# Altium footprint library LimeMicroAltiumLib.PcbLib: 876 footprints (part 42 of 57)
Each footprint in its own frame and in the unit in brackets; x right, y up, seen from the top. Pads: shape width x height; smd on the part's side, far side on the other; paste and mask are expansions set on the pad; w line width, h text height; cw(c..) or ccw(c..) is an arc to the next point about the centre after c.
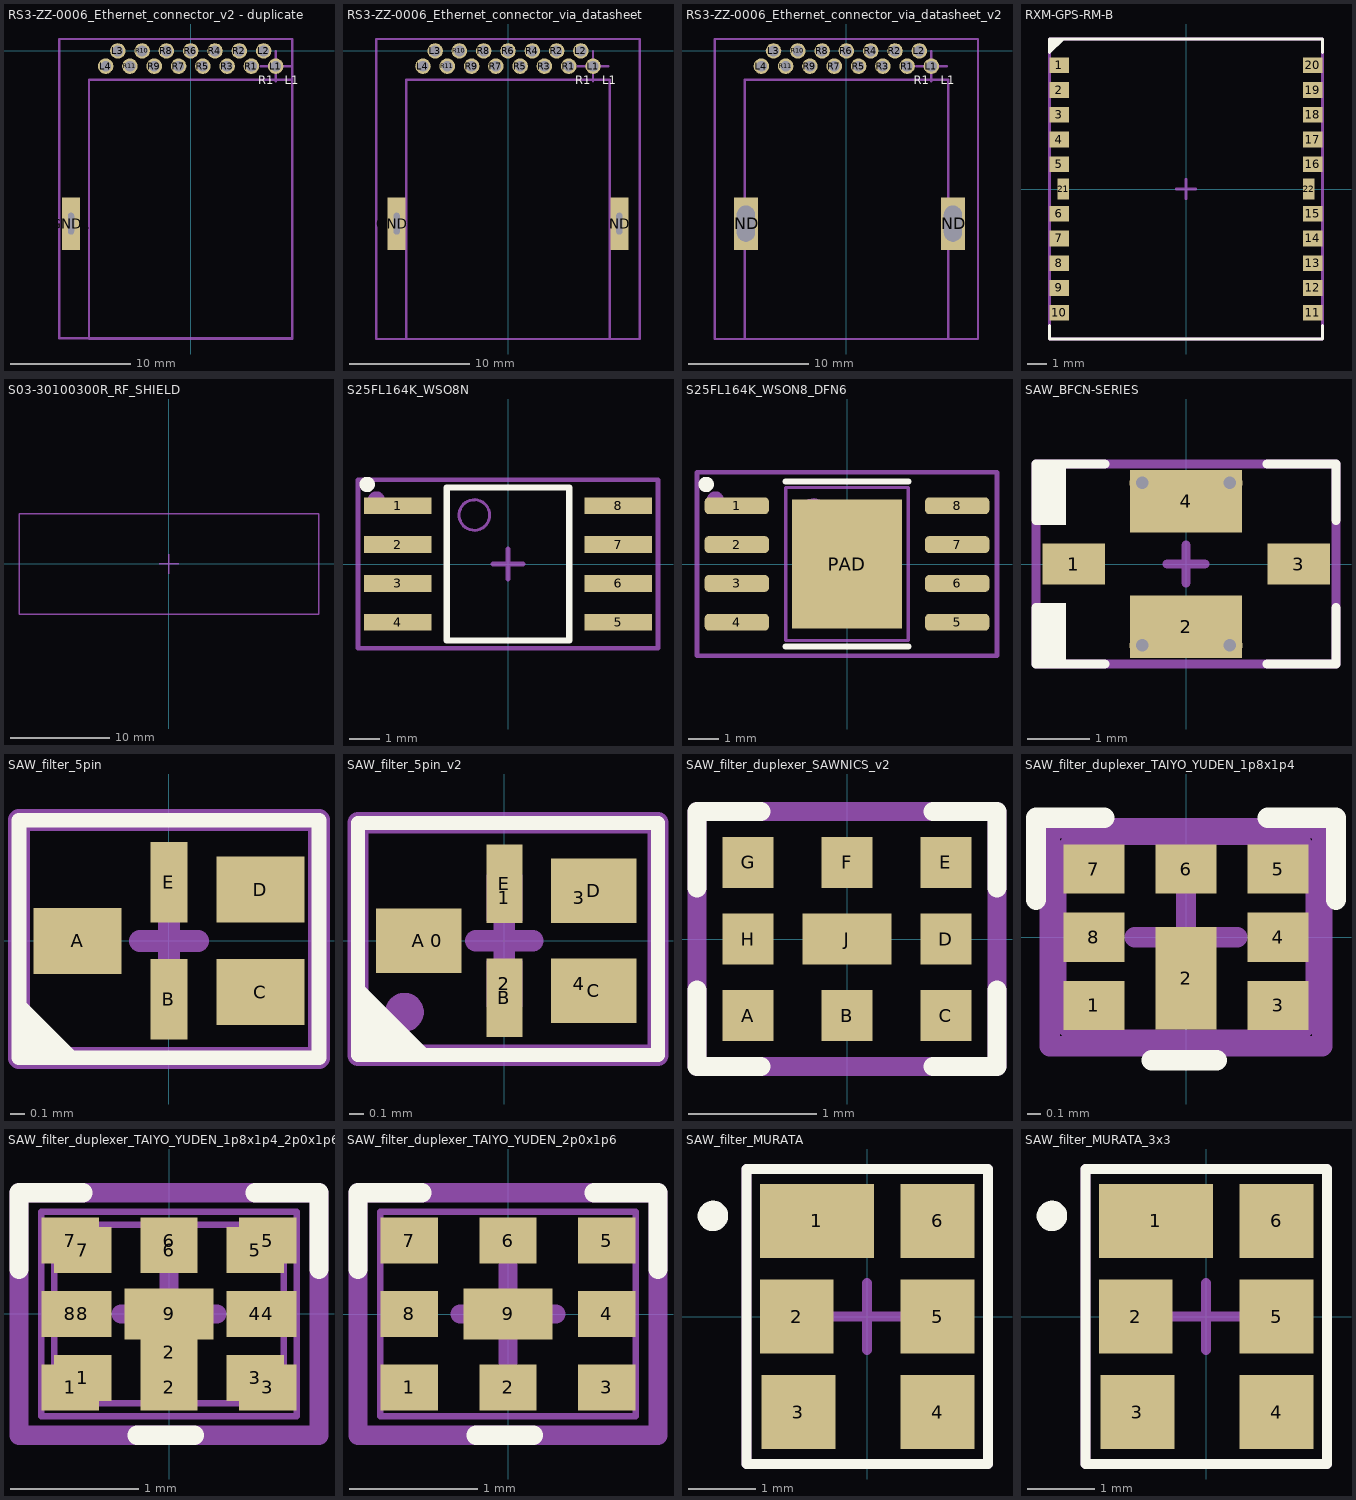
[diagram p41: the footprints below, top view; thin cyan lines are the x and y axes]

## RS3-ZZ-0006_Ethernet_connector_v2 - duplicate [mm] "Footprint created via PCB measurement and approximation"
pads (16):
  rect 1.5x4.4 hole 0.5 slot 1.8 at 90 deg mask+0.05: GND1(-10,-14.43)
  round 1.3 hole 0.9 mask+0.05: L1(7.105,-1.27) L2(6.09,0) L3(-6.09,0) L4(-7.105,-1.27) R1(5.075,-1.27) R2(4.06,0) R3(3.045,-1.27) R4(2.03,0) R5(1.015,-1.27) R6(0,0) R7(-1.015,-1.27) R8(-2.03,0) R9(-3.045,-1.27) R10(-4.06,0) R11(-5.075,-1.27)
Top Overlay:
  text "R1" at 5.625,-2.775 h0.7
  text "L1" at 7.875,-2.775 h0.7
Mechanical 13:
  lines w0.2: -8.5,-24.07 -8.5,-2.4 8.5,-2.4 8.5,-24.07 -8.5,-24.07
Mechanical 15:
  lines w0.2: 5.835,-1.27 7.105,-1.27 ; 7.105,-2.54 7.105,-1.27 ; 7.105,0 7.105,-1.27 ; 8.375,-1.27 7.105,-1.27 ; -11,-24 8.5,-24 8.5,1 -11,1 -11,-24
  text "L1" at 7.875,-2.775 h0.7
  text "R1" at 4.5,-3 h0.7
  text "L4" at -9.5,-2.5 h0.7
  text "L3" at -8.5,0 h0.7
  text "L2" at 7.5,0 h0.7
  text ".Designator" at 0,-12.5 h0.7

## RS3-ZZ-0006_Ethernet_connector_via_datasheet [mm] "Footprint created according to the datasheet"
pads (17):
  rect 1.5x4.4 hole 0.5 slot 1.8 at 90 deg mask+0.05: GND1(-9.3,-14.43) GND2(9.3,-14.43)
  round 1.3 hole 0.9 mask+0.05: L1(7.105,-1.27) L2(6.09,0) L3(-6.09,0) L4(-7.105,-1.27) R1(5.075,-1.27) R2(4.06,0) R3(3.045,-1.27) R4(2.03,0) R5(1.015,-1.27) R6(0,0) R7(-1.015,-1.27) R8(-2.03,0) R9(-3.045,-1.27) R10(-4.06,0) R11(-5.075,-1.27)
Top Overlay:
  text "R1" at 5.625,-2.775 h0.7
  text "L1" at 7.875,-2.775 h0.7
Mechanical 13:
  lines w0.2: -8.5,-24.07 -8.5,-2.4 8.5,-2.4 8.5,-24.07 -8.5,-24.07
Mechanical 15:
  lines w0.2: 5.835,-1.27 7.105,-1.27 ; 7.105,-2.54 7.105,-1.27 ; 7.105,0 7.105,-1.27 ; 8.375,-1.27 7.105,-1.27 ; -11,-24.07 11,-24.07 11,1 -11,1 -11,-24.07
  text "L1" at 7.875,-2.775 h0.7
  text "R1" at 4.5,-3 h0.7
  text "L4" at -9.5,-2.5 h0.7
  text "L3" at -8.5,0 h0.7
  text "L2" at 7.5,0 h0.7
  text ".Designator" at 0,-12.5 h0.7

## RS3-ZZ-0006_Ethernet_connector_via_datasheet_v2 [mm] "Footprint created according to the datasheet"
pads (17):
  rect 2x4.4 hole 1.5 slot 3 at 90 deg mask+0.05: GND2(-8.4,-14.43) GND2(8.9,-14.43)
  round 1.3 hole 0.9 mask+0.05: L1(7.105,-1.27) L2(6.09,0) L3(-6.09,0) L4(-7.105,-1.27) R1(5.075,-1.27) R2(4.06,0) R3(3.045,-1.27) R4(2.03,0) R5(1.015,-1.27) R6(0,0) R7(-1.015,-1.27) R8(-2.03,0) R9(-3.045,-1.27) R10(-4.06,0) R11(-5.075,-1.27)
Top Overlay:
  text "L1" at 7.875,-2.775 h0.7
  text "R1" at 5.625,-2.775 h0.7
Mechanical 13:
  lines w0.2: -8.5,-24.07 8.5,-24.07 8.5,-2.4 -8.5,-2.4 -8.5,-24.07
Mechanical 15:
  lines w0.2: 5.835,-1.27 7.105,-1.27 ; 7.105,-2.54 7.105,-1.27 ; 7.105,0 7.105,-1.27 ; 8.375,-1.27 7.105,-1.27 ; -11,-24.07 -11,1 11,1 11,-24.07 -11,-24.07
  text ".Designator" at 0,-12.5 h0.7
  text "L2" at 7.5,0 h0.7
  text "L3" at -8.5,0 h0.7
  text "L4" at -9.5,-2.5 h0.7
  text "R1" at 4.5,-3 h0.7
  text "L1" at 7.875,-2.775 h0.7

## RXM-GPS-RM-B [mm] "Linx GPS/GNSS receiver RM series"
pads (22):
  rect 1x0.8 smd mask+0.1: 1(-6.5,6.35) 2(-6.5,5.08) 3(-6.5,3.81) 4(-6.5,2.54) 5(-6.5,1.27) 6(-6.5,-1.27) 7(-6.5,-2.54) 8(-6.5,-3.81) 9(-6.5,-5.08) 10(-6.5,-6.35) 11(6.5,-6.35) 12(6.5,-5.08) 13(6.5,-3.81) 14(6.5,-2.54) 15(6.5,-1.27) 16(6.5,1.27) 17(6.5,2.54) 18(6.5,3.81) 19(6.5,5.08) 20(6.5,6.35)
  rect 0.6x1.1 smd mask+0.1: 21(-6.3,0) 22(6.3,0)
Top Overlay:
  region: -7,7 -7,7.7 -6.3,7.7
  lines w0.15: -7,-7 -7,-7.7 7,-7.7 7,-7 ; -6.3,7.7 -7,7 -7,7.7 7,7.7 7,7
Mechanical 15:
  lines w0.15: -0.5,0 0.5,0 ; 0,-0.5 0,0.5 ; -7,-7.7 -7,7.7 7,7.7 7,-7.7 -7,-7.7
  text "1" at -6.4,5.9 h0.55
  text "21" at -6.7,-0.4 h0.55
  text "22" at 5.6,-0.4 h0.55
  text "20" at 5.6,5.9 h0.55
  text "11" at 5.6,-6.75 h0.55
  text "10" at -6.7,-6.8 h0.55
  text ".Designator" at 0,0 h0.55
3D body "User Library-GPS Linx.step": height 2.2, standoff -0.01, extent -6.505,-7.475 6.505,7.525

## S03-30100300R_RF_SHIELD [mm]
Mechanical 15:
  lines w0.15: -1,0 0,0 ; 0,-1 0,0 ; 0,1 0,0 ; 1,0 0,0 ; -15.075,-5.075 15.075,-5.075 15.075,5.075 -15.075,5.075 -15.075,-5.075
  text ".Designator" at 0,0 h0.55
3D body "S03-30100300.stp": height 3.3, standoff 0.15, extent -15.075,-5.075 15.075,5.075

## S25FL164K_WSO8N [mm]
height 1.7
pads (8):
  rect 2.2x0.55 smd: 1(-3.6,1.905) 2(-3.6,0.635) 3(-3.6,-0.635) 4(-3.6,-1.905) 5(3.6,-1.905) 6(3.6,-0.635) 7(3.6,0.635) 8(3.6,1.905)
Top Overlay:
  circle w0.25: c-4.6,2.6 r0.125
  lines w0.2: -2,-2.5 2,-2.5 2,2.5 -2,2.5 -2,-2.5
Mechanical 13:
  circle w0.1: c-1.1,1.6 r0.5
  lines w0.1: -2,-2.5 2,-2.5 2,2.5 -2,2.5 -2,-2.5
Mechanical 15:
  circle w0.35: c-4.3,2.1 r0.1
  lines w0.15: -0.5,0 0.5,0 ; 0,-0.5 0,0.5 ; -4.9,-2.75 4.9,-2.75 4.9,2.75 -4.9,2.75 -4.9,-2.75
  text ".Designator" at 0,0 h0.55
3D body "User Library-SOIC8_Wide_5mmx5mm.step": height 1.75, standoff -0.01, extent -4.151,-2.73 3.95,2.73

## S25FL164K_WSON8_DFN6 [mm] "WSON8 and DFN8 6x5mm compatible footprint"
height 1.7
pads (9):
  rrect50% 2.1x0.55 smd mask+0.05: 1(-3.6,1.905) 2(-3.6,0.635) 3(-3.6,-0.635) 4(-3.6,-1.905) 5(3.6,-1.905) 6(3.6,-0.635) 7(3.6,0.635) 8(3.6,1.905)
  rect 3.6x4.2 smd mask+0.05: PAD(0,0)
Top Overlay:
  circle w0.25: c-4.6,2.6 r0.125
  lines w0.2: -2,-2.7 2,-2.7 ; -2,2.7 2,2.7
Mechanical 13:
  circle w0.1: c-1.1,1.6 r0.5
  lines w0.1: -2,-2.5 2,-2.5 2,2.5 -2,2.5 -2,-2.5
Mechanical 15:
  circle w0.35: c-4.3,2.1 r0.1
  lines w0.15: -0.5,0 0.5,0 ; 0,-0.5 0,0.5 ; -4.9,-3 4.9,-3 4.9,3 -4.9,3 -4.9,-3
  text ".Designator" at 0,0 h0.55
3D body "User Library-DFN8-5X6.STEP": height 0.95, standoff 0, extent -3.05,-2.5 3.05,2.5
3D body "User Library-SOIC8_Wide_5mmx5mm.step": height 1.75, standoff -0.01, extent -4.151,-2.73 3.95,2.73
3D body "User Library-WSON-8_6x8mm.STEP": height 0.81, standoff -0.07, extent -4.1,-3 3.9,3

## SAW_BFCN-SERIES [mm] "BFCN-1860+, 2435+, 2700+, 2850+, 4085+"
pads (4):
  rect 1x0.65 smd mask+0.05: 1(-1.8,0) 3(1.8,0)
  rect 1.8x1 smd mask+0.05: 2(0,-1) 4(0,1)
via -0.7,1.3 diameter 0.4 hole 0.2
via 0.7,1.3 diameter 0.4 hole 0.2
via 0.7,-1.3 diameter 0.4 hole 0.2
via -0.7,-1.3 diameter 0.4 hole 0.2
Top Overlay:
  region: -2.4,0.625 -1.925,0.625 -1.925,1.6 -2.4,1.6
  region: -2.4,-0.625 -1.925,-0.625 -1.925,-1.6 -2.4,-1.6
  lines w0.15: -2.4,-0.7 -2.4,-1.6 -1.3,-1.6 ; -2.4,0.7 -2.4,1.6 -1.3,1.6 ; 1.3,-1.6 2.4,-1.6 2.4,-0.7 ; 1.3,1.6 2.4,1.6 2.4,0.7
Mechanical 15:
  circle w0.25: c-1.8,0 r0.1
  lines w0.15: -0.3,0 0.3,0 ; 0,-0.3 0,0.3 ; -2.4,-1.6 -2.4,1.6 2.4,1.6 2.4,-1.6 -2.4,-1.6
  text ".Designator" at 0,0 h0.55
3D body: height 1, standoff 0, extent -1.6,-0.8 1.6,0.8

## SAW_filter_5pin [mm]
pads (5):
  rect 0.6x0.45 smd mask+0.05: A(-0.625,0) C(0.625,-0.35) D(0.625,0.35)
  rect 0.25x0.55 smd mask+0.05: B(0,-0.4) E(0,0.4)
Top Overlay:
  region: -1.025,-0.375 -0.6,-0.8 -1.025,-0.8
  lines w0.1: -1.025,-0.8 1.025,-0.8 1.025,0.825 -1.025,0.825 -1.025,-0.8
Mechanical 15:
  lines w0.15: -0.2,0 0.2,0 ; 0,-0.2 0,0.2 ; -1.025,-0.8 -1.025,0.825 1.025,0.825 1.025,-0.8 -1.025,-0.8
  text ".Designator" at 0.075,0 h0.55
3D body: height 0.4, standoff 0, extent -0.7,-0.55 0.7,0.55

## SAW_filter_5pin_v2 [mm]
pads (10):
  rect 0.25x0.325 on Mech13 mask+0.05: 0(-0.475,0) 1(0,0.3) 2(0,-0.3) 3(0.525,0.3) 4(0.525,-0.3)
  rect 0.6x0.45 smd mask+0.05: A(-0.6,0) C(0.625,-0.35) D(0.625,0.35)
  rect 0.25x0.55 smd mask+0.05: B(0,-0.4) E(0,0.4)
Top Overlay:
  region: -1.025,-0.275 -0.5,-0.8 -1.025,-0.8
  lines w0.1: -1.025,-0.8 1.075,-0.8 1.075,0.825 -1.025,0.825 -1.025,-0.8
Mechanical 15:
  circle w0.2: c-0.7,-0.5 r0.035
  lines w0.15: -0.2,0 0.2,0 ; 0,-0.2 0,0.2 ; -1.025,-0.8 -1.025,0.825 1.075,0.825 1.075,-0.8 -1.025,-0.8
  text ".Designator" at 0.075,0 h0.55
3D body: height 0.4, standoff 0, extent -0.7,-0.55 0.7,0.55

## SAW_filter_duplexer_SAWNICS_v2 [mm]
pads (9):
  rect 0.4x0.4 smd mask+0.05: A(-0.775,-0.6) B(0,-0.6) C(0.775,-0.6) D(0.775,0) E(0.775,0.6) F(0,0.6) G(-0.775,0.6) H(-0.775,0)
  rect 0.7x0.4 smd mask+0.05: J(0,0)
Top Overlay:
  lines w0.15: -1.175,-0.4 -1.175,-1 -0.675,-1 ; -1.175,0.4 -1.175,1 -0.675,1 ; 0.675,-1 1.175,-1 1.175,-0.4 ; 0.675,1 1.175,1 1.175,0.4
Mechanical 15:
  circle w0.2: c-0.75,-0.575 r0.035
  lines w0.15: -1.175,-1 1.175,-1 1.175,1 -1.175,1 -1.175,-1
  text ".Designator" at -0.025,0 h0.55
3D body: height 0.5, standoff 0, extent -1.025,-0.8 0.975,0.8

## SAW_filter_duplexer_TAIYO_YUDEN_1p8x1p4 [mm] "Duplexer Taiyo Yuden 1.8 mm x 1.4 mm size (ex. band 3 D6DA1G842K2C4)"
pads (8):
  rect 0.45x0.36 smd mask+0.05: 1(-0.675,-0.5) 3(0.675,-0.5) 4(0.675,0) 5(0.675,0.5) 6(0,0.5) 7(-0.675,0.5) 8(-0.675,0)
  rect 0.45x0.75 smd mask+0.05: 2(0,-0.3)
Top Overlay:
  lines w0.15: -1.1,0.275 -1.1,0.875 -0.6,0.875 ; -0.25,-0.9 0.225,-0.9 ; 0.6,0.875 1.1,0.875 1.1,0.275
Top Solder:
  region: -0.95,-0.725 -0.95,0.725 -0.4,0.725 -0.4,-0.725
  region: 0.95,-0.725 0.95,0.725 0.4,0.725 0.4,-0.725
Mechanical 13:
  region: -0.15,-0.575 -0.15,-0.005 0.15,-0.005 0.15,-0.575
  region: 0.775,-0.575 0.775,-0.345 0.475,-0.345 0.475,-0.575
  region: 0.775,0.345 0.775,0.575 0.475,0.575 0.475,0.345
  region: 0.775,-0.115 0.775,0.115 0.475,0.115 0.475,-0.115
  region: -0.15,0.345 -0.15,0.575 0.15,0.575 0.15,0.345
  region: -0.775,-0.115 -0.775,0.115 -0.475,0.115 -0.475,-0.115
  region: -0.775,0.345 -0.775,0.575 -0.475,0.575 -0.475,0.345
  region: -0.775,-0.575 -0.775,-0.345 -0.475,-0.345 -0.475,-0.575
  lines w0.05: -0.9,-0.7 0.9,-0.7 0.9,0.7 -0.9,0.7 -0.9,-0.7
  text "7" at -0.425,0.37 h0.2
  text "5" at 0.3,0.375 h0.2
  text "3" at 0.3,-0.55 h0.2
  text "1" at -0.425,-0.55 h0.2
Mechanical 15:
  circle w0.2: c-0.65,-0.5 r0.035
  lines w0.15: -0.375,0 0,0 ; 0,-0.375 0,0 ; 0,0.375 0,0 ; 0.375,0 0,0 ; -1,-0.8 -1,0.8 1,0.8 1,-0.8 -1,-0.8
  text ".Designator" at 0.075,0.075 h0.55
3D body: height 0.5, standoff 0, extent -0.9,-0.7 0.9,0.7

## SAW_filter_duplexer_TAIYO_YUDEN_1p8x1p4_2p0x1p6 [mm] "Duplexer Taiyo Yuden unified 1.8 mm x 1.4 mm size and 2 mm x 1.6 mm packages"
pads (17):
  rect 0.45x0.36 smd mask+0.05: 1(-0.775,-0.575) 1(-0.675,-0.5) 2(0,-0.575) 3(0.675,-0.5) 3(0.775,-0.575) 4(0.675,0) 4(0.775,0) 5(0.675,0.5) 5(0.775,0.575) 6(0,0.5) 6(0,0.575) 7(-0.775,0.575) 7(-0.675,0.5) 8(-0.775,0) 8(-0.675,0)
  rect 0.45x0.75 smd mask+0.05: 2(0,-0.3)
  rect 0.7x0.4 smd mask+0.05: 9(0,0)
Top Overlay:
  lines w0.15: -1.175,0.35 -1.175,0.95 -0.675,0.95 ; -0.25,-0.95 0.2,-0.95 ; 0.675,0.95 1.175,0.95 1.175,0.35
Top Solder:
  region: -1.05,-0.825 -1.05,0.825 1.05,0.825 1.05,-0.825
Mechanical 13:
  region: -0.15,-0.575 -0.15,-0.005 0.15,-0.005 0.15,-0.575
  region: 0.775,-0.575 0.775,-0.345 0.475,-0.345 0.475,-0.575
  region: 0.775,0.345 0.775,0.575 0.475,0.575 0.475,0.345
  region: 0.775,-0.115 0.775,0.115 0.475,0.115 0.475,-0.115
  region: -0.15,0.345 -0.15,0.575 0.15,0.575 0.15,0.345
  region: -0.775,-0.115 -0.775,0.115 -0.475,0.115 -0.475,-0.115
  region: -0.775,0.345 -0.775,0.575 -0.475,0.575 -0.475,0.345
  region: -0.775,-0.575 -0.775,-0.345 -0.475,-0.345 -0.475,-0.575
  region: 0.625,-0.15 0.625,0.15 0.925,0.15 0.925,-0.15
  region: -0.3,-0.15 -0.3,0.15 0.3,0.15 0.3,-0.15
  region: -0.925,0.725 -0.925,0.425 -0.625,0.425 -0.625,0.725
  region: -0.15,0.725 -0.15,0.425 0.15,0.425 0.15,0.725
  region: 0.625,0.725 0.625,0.425 0.925,0.425 0.925,0.725
  region: 0.625,-0.725 0.625,-0.425 0.925,-0.425 0.925,-0.725
  region: -0.925,-0.15 -0.925,0.15 -0.625,0.15 -0.625,-0.15
  region: -0.15,-0.725 -0.15,-0.425 0.15,-0.425 0.15,-0.725
  region: -0.925,-0.725 -0.925,-0.425 -0.625,-0.425 -0.625,-0.725
  lines w0.05: -1,-0.8 -1,0.8 1,0.8 1,-0.8 -1,-0.8 ; -0.9,-0.7 0.9,-0.7 0.9,0.7 -0.9,0.7 -0.9,-0.7
  text "7" at -0.425,0.37 h0.2
  text "5" at 0.3,0.375 h0.2
  text "3" at 0.3,-0.55 h0.2
  text "1" at -0.425,-0.55 h0.2
  text "1" at -0.55,-0.675 h0.2
  text "3" at 0.4,-0.675 h0.2
  text "5" at 0.4,0.475 h0.2
  text "7" at -0.55,0.475 h0.2
Mechanical 15:
  circle w0.2: c-0.8,-0.575 r0.035
  lines w0.15: -0.375,0 0,0 ; 0,-0.375 0,0 ; 0,0.375 0,0 ; 0.375,0 0,0 ; -1.175,-0.95 -1.175,0.95 1.175,0.95 1.175,-0.95 -1.175,-0.95
  text ".Designator" at 0,0 h0.55
3D body: height 0.5, standoff 0, extent -0.9,-0.7 0.9,0.7
3D body: height 0.5, standoff 0, extent -1,-0.8 1,0.8
3D body: height 0.55, standoff 0.5, extent -0.898,-0.699 -0.5,-0.3

## SAW_filter_duplexer_TAIYO_YUDEN_2p0x1p6 [mm] "Duplexer Taiyo Yuden 2 mm x 1.6 mm size (ex. band 2 D6PE1G960P3BP)"
pads (9):
  rect 0.45x0.36 smd mask+0.05: 1(-0.775,-0.575) 2(0,-0.575) 3(0.775,-0.575) 4(0.775,0) 5(0.775,0.575) 6(0,0.575) 7(-0.775,0.575) 8(-0.775,0)
  rect 0.7x0.4 smd mask+0.05: 9(0,0)
Top Overlay:
  lines w0.15: -1.175,0.35 -1.175,0.95 -0.675,0.95 ; -0.25,-0.95 0.2,-0.95 ; 0.675,0.95 1.175,0.95 1.175,0.35
Mechanical 13:
  region: -0.925,-0.725 -0.925,-0.425 -0.625,-0.425 -0.625,-0.725
  region: -0.15,-0.725 -0.15,-0.425 0.15,-0.425 0.15,-0.725
  region: -0.925,-0.15 -0.925,0.15 -0.625,0.15 -0.625,-0.15
  region: 0.625,-0.725 0.625,-0.425 0.925,-0.425 0.925,-0.725
  region: 0.625,0.725 0.625,0.425 0.925,0.425 0.925,0.725
  region: -0.15,0.725 -0.15,0.425 0.15,0.425 0.15,0.725
  region: -0.925,0.725 -0.925,0.425 -0.625,0.425 -0.625,0.725
  region: -0.3,-0.15 -0.3,0.15 0.3,0.15 0.3,-0.15
  region: 0.625,-0.15 0.625,0.15 0.925,0.15 0.925,-0.15
  lines w0.05: -1,-0.8 1,-0.8 1,0.8 -1,0.8 -1,-0.8
  text "7" at -0.55,0.475 h0.2
  text "5" at 0.4,0.475 h0.2
  text "3" at 0.4,-0.675 h0.2
  text "1" at -0.55,-0.675 h0.2
Mechanical 15:
  circle w0.2: c-0.8,-0.575 r0.035
  lines w0.15: -0.375,0 0,0 ; 0,-0.375 0,0 ; 0,0.375 0,0 ; 0.375,0 0,0 ; -1.175,-0.95 1.175,-0.95 1.175,0.95 -1.175,0.95 -1.175,-0.95
  text ".Designator" at 0,0 h0.55
3D body: height 0.5, standoff 0, extent -1,-0.8 1,0.8

## SAW_filter_MURATA [mm]
pads (6):
  rect 1.7x1.1 smd: 1(-0.75,1.425)
  rect 1.1x1.1 smd: 2(-1.05,0) 3(-1.025,-1.425) 4(1.05,-1.425) 5(1.05,0) 6(1.05,1.425)
Top Overlay:
  circle w0.254: c-2.3,1.5 r0.1
  lines w0.15: -1.8,-2.2 1.8,-2.2 1.8,2.2 -1.8,2.2 -1.8,-2.2
Mechanical 15:
  circle w0.254: c-0.8,1.5 r0.1
  lines w0.15: -0.5,0 0,0 ; 0,-0.5 0,0 ; 0,0.5 0,0 ; 0.5,0 0,0 ; -1.8,-2.2 -1.8,2.2 1.8,2.2 1.8,-2.2 -1.8,-2.2
  text ".Designator" at 0,0 h0.55
3D body "SW3dPS-DCC6C.STEP": height 1.14, standoff -0.09, extent -1.475,-1.475 1.525,1.525

## SAW_filter_MURATA_3x3 [mm]
pads (6):
  rect 1.7x1.1 smd: 1(-0.75,1.425)
  rect 1.1x1.1 smd: 2(-1.05,0) 3(-1.025,-1.425) 4(1.05,-1.425) 5(1.05,0) 6(1.05,1.425)
Top Overlay:
  circle w0.254: c-2.3,1.5 r0.1
  lines w0.15: -1.8,-2.2 1.8,-2.2 1.8,2.2 -1.8,2.2 -1.8,-2.2
Mechanical 15:
  circle w0.254: c-0.8,1.5 r0.1
  lines w0.15: -0.5,0 0,0 ; 0,-0.5 0,0 ; 0,0.5 0,0 ; 0.5,0 0,0 ; -1.8,-2.2 -1.8,2.2 1.8,2.2 1.8,-2.2 -1.8,-2.2
  text ".Designator" at 0,0 h0.55
3D body "SW3dPS-DCC6C.STEP": height 1.14, standoff -0.09, extent -1.475,-1.475 1.525,1.525